# Altium footprint library MAX22190ATJ&plus_.PcbLib: 3 footprints
Each footprint in its own frame and in the unit in brackets; x right, y up, seen from the top. Pads: shape width x height; smd on the part's side, far side on the other; paste and mask are expansions set on the pad; w line width, h text height; cw(c..) or ccw(c..) is an arc to the next point about the centre after c.
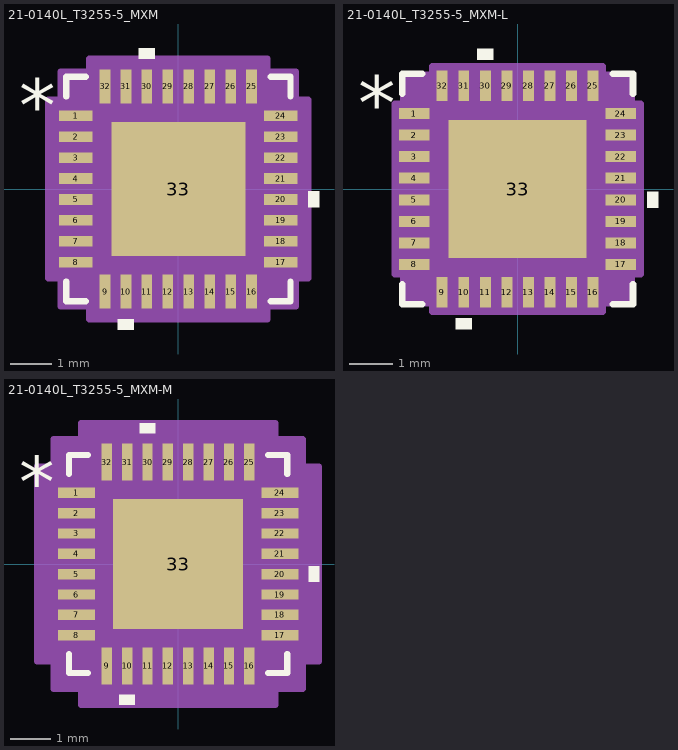
[diagram p0: the footprints below, top view; thin cyan lines are the x and y axes]

## 21-0140L_T3255-5_MXM [mm]
pads (33):
  rect 0.808x0.255 smd paste+0 mask+0: 1(-2.449,1.75) 2(-2.449,1.25) 3(-2.449,0.75) 4(-2.449,0.25) 5(-2.449,-0.25) 6(-2.449,-0.75) 7(-2.449,-1.25) 8(-2.449,-1.75) 17(2.449,-1.75) 18(2.449,-1.25) 19(2.449,-0.75) 20(2.449,-0.25) 21(2.449,0.25) 22(2.449,0.75) 23(2.449,1.25) 24(2.449,1.75)
  rect 0.255x0.808 smd paste+0 mask+0: 9(-1.75,-2.449) 10(-1.25,-2.449) 11(-0.75,-2.449) 12(-0.25,-2.449) 13(0.25,-2.449) 14(0.75,-2.449) 15(1.25,-2.449) 16(1.75,-2.449) 25(1.75,2.449) 26(1.25,2.449) 27(0.75,2.449) 28(0.25,2.449) 29(-0.25,2.449) 30(-0.75,2.449) 31(-1.25,2.449) 32(-1.75,2.449)
  rect 3.2x3.2 smd paste-1.6 mask+0: 33(0,0)
Top Overlay:
  region: -1.06,-3.107 -1.441,-3.107 -1.441,-3.361 -1.06,-3.361
  region: 3.107,-0.059 3.361,-0.059 3.361,-0.44 3.107,-0.44
  region: -0.56,3.107 -0.941,3.107 -0.941,3.361 -0.56,3.361
  lines w0.152: -2.68,-2.21 -2.68,-2.68 -2.21,-2.68 ; -2.68,2.21 -2.68,2.68 -2.21,2.68 ; 2.21,-2.68 2.68,-2.68 2.68,-2.21 ; 2.21,2.68 2.68,2.68 2.68,2.21
  text "*" at -3.805,1.365 h1.27
  text ".Designator" at -3.492,-0.635 h1.27
Top Paste:
  region: -0.1,1.5 -1.5,1.5 -1.5,0.1 -0.1,0.1
  region: -0.1,-0.1 -1.5,-0.1 -1.5,-1.5 -0.1,-1.5
  region: 1.5,1.5 0.1,1.5 0.1,0.1 1.5,0.1
  region: 1.5,-0.1 0.1,-0.1 0.1,-1.5 1.5,-1.5
Mechanical 13:
  lines w0.025: -2.553,1.283 -1.283,2.553 ; -2.553,-2.553 2.553,-2.553 ; -2.553,-2.553 -2.553,2.553 ; -2.553,-2.553 -2.553,-2.553 ; -2.553,-1.902 -2.553,-1.598 ; -2.553,-1.902 -2.553,-1.598 ; -2.553,-1.902 -2.553,-1.902 ; -2.553,-1.598 -2.553,-1.598 ; -2.553,-1.402 -2.553,-1.098 ; -2.553,-1.402 -2.553,-1.098 ; -2.553,-1.402 -2.553,-1.402 ; -2.553,-1.098 -2.553,-1.098 ; -2.553,-0.902 -2.553,-0.598 ; -2.553,-0.902 -2.553,-0.598 ; -2.553,-0.902 -2.553,-0.902 ; -2.553,-0.598 -2.553,-0.598 ; -2.553,-0.402 -2.553,-0.098 ; -2.553,-0.402 -2.553,-0.098 ; -2.553,-0.402 -2.553,-0.402 ; -2.553,-0.098 -2.553,-0.098 ; -2.553,0.098 -2.553,0.402 ; -2.553,0.098 -2.553,0.402 ; -2.553,0.098 -2.553,0.098 ; -2.553,0.402 -2.553,0.402 ; -2.553,0.598 -2.553,0.902 ; -2.553,0.598 -2.553,0.902 ; -2.553,0.598 -2.553,0.598 ; -2.553,0.902 -2.553,0.902 ; -2.553,1.098 -2.553,1.402 ; -2.553,1.098 -2.553,1.402 ; -2.553,1.098 -2.553,1.098 ; -2.553,1.402 -2.553,1.402 ; -2.553,1.598 -2.553,1.902 ; -2.553,1.598 -2.553,1.902 ; -2.553,1.598 -2.553,1.598 ; -2.553,1.902 -2.553,1.902 ; -2.553,2.553 2.553,2.553 ; -2.553,2.553 -2.553,2.553 ; -1.902,-2.553 -1.598,-2.553 ; -1.902,-2.553 -1.902,-2.553 ; -1.902,-2.553 -1.598,-2.553 ; -1.902,2.553 -1.598,2.553 ; -1.902,2.553 -1.598,2.553 ; -1.902,2.553 -1.902,2.553 ; -1.598,-2.553 -1.598,-2.553 ; -1.598,2.553 -1.598,2.553 ; -1.402,-2.553 -1.098,-2.553 ; -1.402,-2.553 -1.402,-2.553 ; -1.402,-2.553 -1.098,-2.553 ; -1.402,2.553 -1.098,2.553 ; -1.402,2.553 -1.098,2.553 ; -1.402,2.553 -1.402,2.553 ; -1.098,-2.553 -1.098,-2.553 ; -1.098,2.553 -1.098,2.553 ; -0.902,-2.553 -0.598,-2.553 ; -0.902,-2.553 -0.902,-2.553 ; -0.902,-2.553 -0.598,-2.553 ; -0.902,2.553 -0.598,2.553 ; -0.902,2.553 -0.598,2.553 ; -0.902,2.553 -0.902,2.553 ; -0.598,-2.553 -0.598,-2.553 ; -0.598,2.553 -0.598,2.553 ; -0.402,-2.553 -0.098,-2.553 ; -0.402,-2.553 -0.402,-2.553 ; -0.402,-2.553 -0.098,-2.553 ; -0.402,2.553 -0.098,2.553 ; -0.402,2.553 -0.098,2.553 ; -0.402,2.553 -0.402,2.553 ; -0.098,-2.553 -0.098,-2.553 ; -0.098,2.553 -0.098,2.553 ; 0.098,-2.553 0.402,-2.553 ; 0.098,-2.553 0.098,-2.553 ; 0.098,-2.553 0.402,-2.553 ; 0.098,2.553 0.402,2.553 ; 0.098,2.553 0.402,2.553 ; 0.098,2.553 0.098,2.553 ; 0.402,-2.553 0.402,-2.553 ; 0.402,2.553 0.402,2.553 ; 0.598,-2.553 0.902,-2.553 ; 0.598,-2.553 0.598,-2.553 ; 0.598,-2.553 0.902,-2.553 ; 0.598,2.553 0.902,2.553 ; 0.598,2.553 0.902,2.553 ; 0.598,2.553 0.598,2.553 ; 0.902,-2.553 0.902,-2.553 ; 0.902,2.553 0.902,2.553 ; 1.098,-2.553 1.402,-2.553 ; 1.098,-2.553 1.098,-2.553 ; 1.098,-2.553 1.402,-2.553 ; 1.098,2.553 1.402,2.553 ; 1.098,2.553 1.402,2.553 ; 1.098,2.553 1.098,2.553 ; 1.402,-2.553 1.402,-2.553 ; 1.402,2.553 1.402,2.553 ; 1.598,-2.553 1.902,-2.553 ; 1.598,-2.553 1.598,-2.553 ; 1.598,-2.553 1.902,-2.553 ; 1.598,2.553 1.902,2.553 ; 1.598,2.553 1.902,2.553 ; 1.598,2.553 1.598,2.553 ; 1.902,-2.553 1.902,-2.553 ; 1.902,2.553 1.902,2.553 ; 2.553,-2.553 2.553,-2.553 ; 2.553,-2.553 2.553,2.553 ; 2.553,-1.902 2.553,-1.598 ; 2.553,-1.902 2.553,-1.902 ; 2.553,-1.902 2.553,-1.598 ; 2.553,-1.598 2.553,-1.598 ; 2.553,-1.402 2.553,-1.098 ; 2.553,-1.402 2.553,-1.402 ; 2.553,-1.402 2.553,-1.098 ; 2.553,-1.098 2.553,-1.098 ; 2.553,-0.902 2.553,-0.598 ; 2.553,-0.902 2.553,-0.902 ; 2.553,-0.902 2.553,-0.598 ; 2.553,-0.598 2.553,-0.598 ; 2.553,-0.402 2.553,-0.098 ; 2.553,-0.402 2.553,-0.402 ; 2.553,-0.402 2.553,-0.098 ; 2.553,-0.098 2.553,-0.098 ; 2.553,0.098 2.553,0.402 ; 2.553,0.098 2.553,0.098 ; 2.553,0.098 2.553,0.402 ; 2.553,0.402 2.553,0.402 ; 2.553,0.598 2.553,0.902 ; 2.553,0.598 2.553,0.598 ; 2.553,0.598 2.553,0.902 ; 2.553,0.902 2.553,0.902 ; 2.553,1.098 2.553,1.402 ; 2.553,1.098 2.553,1.098 ; 2.553,1.098 2.553,1.402 ; 2.553,1.402 2.553,1.402 ; 2.553,1.598 2.553,1.902 ; 2.553,1.598 2.553,1.598 ; 2.553,1.598 2.553,1.902 ; 2.553,1.902 2.553,1.902 ; 2.553,2.553 2.553,2.553
  text ".Designator" at -3.492,-0.635 h1.27
  text "*" at -2.362,1.365 h1.27
Mechanical 15:
  region: -2.131,-2.807 -2.807,-2.807 -2.807,-2.131 -3.107,-2.131 -3.107,2.131 -2.807,2.131 -2.807,2.807 -2.131,2.807 -2.131,3.107 2.131,3.107 2.131,2.807 2.807,2.807 2.807,2.131 3.107,2.131 3.107,-2.131 2.807,-2.131 2.807,-2.807 2.131,-2.807 2.131,-3.107 -2.131,-3.107
  lines w0.152: -3.107,-2.131 -2.807,-2.131 -2.807,-2.807 -2.131,-2.807 -2.131,-3.107 2.131,-3.107 2.131,-2.807 2.807,-2.807 2.807,-2.131 3.107,-2.131 3.107,2.131 2.807,2.131 2.807,2.807 2.131,2.807 2.131,3.107 -2.131,3.107 -2.131,2.807 -2.807,2.807 -2.807,2.131 -3.107,2.131 -3.107,-2.131
3D body "21-0140L_T3255-5_MXM.step": height 0.81, standoff 0, extent -2.553,-2.553 2.553,2.553

## 21-0140L_T3255-5_MXM-L [mm]
pads (33):
  rect 0.708x0.255 smd paste+0 mask+0: 1(-2.399,1.75) 2(-2.399,1.25) 3(-2.399,0.75) 4(-2.399,0.25) 5(-2.399,-0.25) 6(-2.399,-0.75) 7(-2.399,-1.25) 8(-2.399,-1.75) 17(2.399,-1.75) 18(2.399,-1.25) 19(2.399,-0.75) 20(2.399,-0.25) 21(2.399,0.25) 22(2.399,0.75) 23(2.399,1.25) 24(2.399,1.75)
  rect 0.255x0.708 smd paste+0 mask+0: 9(-1.75,-2.399) 10(-1.25,-2.399) 11(-0.75,-2.399) 12(-0.25,-2.399) 13(0.25,-2.399) 14(0.75,-2.399) 15(1.25,-2.399) 16(1.75,-2.399) 25(1.75,2.399) 26(1.25,2.399) 27(0.75,2.399) 28(0.25,2.399) 29(-0.25,2.399) 30(-0.75,2.399) 31(-1.25,2.399) 32(-1.75,2.399)
  rect 3.2x3.2 smd paste-1.6 mask+0: 33(0,0)
Top Overlay:
  region: -1.06,-3.007 -1.441,-3.007 -1.441,-3.261 -1.06,-3.261
  region: 3.007,-0.059 3.261,-0.059 3.261,-0.44 3.007,-0.44
  region: -0.56,3.007 -0.941,3.007 -0.941,3.261 -0.56,3.261
  lines w0.152: -2.68,-2.21 -2.68,-2.68 -2.21,-2.68 ; -2.68,2.21 -2.68,2.68 -2.21,2.68 ; 2.21,-2.68 2.68,-2.68 2.68,-2.21 ; 2.21,2.68 2.68,2.68 2.68,2.21
  text "*" at -3.705,1.365 h1.27
  text ".Designator" at -3.492,-0.635 h1.27
Top Paste:
  region: -0.1,1.5 -1.5,1.5 -1.5,0.1 -0.1,0.1
  region: -0.1,-0.1 -1.5,-0.1 -1.5,-1.5 -0.1,-1.5
  region: 1.5,1.5 0.1,1.5 0.1,0.1 1.5,0.1
  region: 1.5,-0.1 0.1,-0.1 0.1,-1.5 1.5,-1.5
Mechanical 13:
  lines w0.025: -2.553,1.283 -1.283,2.553 ; -2.553,-2.553 2.553,-2.553 ; -2.553,-2.553 -2.553,2.553 ; -2.553,-2.553 -2.553,-2.553 ; -2.553,-1.902 -2.553,-1.598 ; -2.553,-1.902 -2.553,-1.598 ; -2.553,-1.902 -2.553,-1.902 ; -2.553,-1.598 -2.553,-1.598 ; -2.553,-1.402 -2.553,-1.098 ; -2.553,-1.402 -2.553,-1.098 ; -2.553,-1.402 -2.553,-1.402 ; -2.553,-1.098 -2.553,-1.098 ; -2.553,-0.902 -2.553,-0.598 ; -2.553,-0.902 -2.553,-0.598 ; -2.553,-0.902 -2.553,-0.902 ; -2.553,-0.598 -2.553,-0.598 ; -2.553,-0.402 -2.553,-0.098 ; -2.553,-0.402 -2.553,-0.098 ; -2.553,-0.402 -2.553,-0.402 ; -2.553,-0.098 -2.553,-0.098 ; -2.553,0.098 -2.553,0.402 ; -2.553,0.098 -2.553,0.402 ; -2.553,0.098 -2.553,0.098 ; -2.553,0.402 -2.553,0.402 ; -2.553,0.598 -2.553,0.902 ; -2.553,0.598 -2.553,0.902 ; -2.553,0.598 -2.553,0.598 ; -2.553,0.902 -2.553,0.902 ; -2.553,1.098 -2.553,1.402 ; -2.553,1.098 -2.553,1.402 ; -2.553,1.098 -2.553,1.098 ; -2.553,1.402 -2.553,1.402 ; -2.553,1.598 -2.553,1.902 ; -2.553,1.598 -2.553,1.902 ; -2.553,1.598 -2.553,1.598 ; -2.553,1.902 -2.553,1.902 ; -2.553,2.553 2.553,2.553 ; -2.553,2.553 -2.553,2.553 ; -1.902,-2.553 -1.598,-2.553 ; -1.902,-2.553 -1.902,-2.553 ; -1.902,-2.553 -1.598,-2.553 ; -1.902,2.553 -1.598,2.553 ; -1.902,2.553 -1.598,2.553 ; -1.902,2.553 -1.902,2.553 ; -1.598,-2.553 -1.598,-2.553 ; -1.598,2.553 -1.598,2.553 ; -1.402,-2.553 -1.098,-2.553 ; -1.402,-2.553 -1.402,-2.553 ; -1.402,-2.553 -1.098,-2.553 ; -1.402,2.553 -1.098,2.553 ; -1.402,2.553 -1.098,2.553 ; -1.402,2.553 -1.402,2.553 ; -1.098,-2.553 -1.098,-2.553 ; -1.098,2.553 -1.098,2.553 ; -0.902,-2.553 -0.598,-2.553 ; -0.902,-2.553 -0.902,-2.553 ; -0.902,-2.553 -0.598,-2.553 ; -0.902,2.553 -0.598,2.553 ; -0.902,2.553 -0.598,2.553 ; -0.902,2.553 -0.902,2.553 ; -0.598,-2.553 -0.598,-2.553 ; -0.598,2.553 -0.598,2.553 ; -0.402,-2.553 -0.098,-2.553 ; -0.402,-2.553 -0.402,-2.553 ; -0.402,-2.553 -0.098,-2.553 ; -0.402,2.553 -0.098,2.553 ; -0.402,2.553 -0.098,2.553 ; -0.402,2.553 -0.402,2.553 ; -0.098,-2.553 -0.098,-2.553 ; -0.098,2.553 -0.098,2.553 ; 0.098,-2.553 0.402,-2.553 ; 0.098,-2.553 0.098,-2.553 ; 0.098,-2.553 0.402,-2.553 ; 0.098,2.553 0.402,2.553 ; 0.098,2.553 0.402,2.553 ; 0.098,2.553 0.098,2.553 ; 0.402,-2.553 0.402,-2.553 ; 0.402,2.553 0.402,2.553 ; 0.598,-2.553 0.902,-2.553 ; 0.598,-2.553 0.598,-2.553 ; 0.598,-2.553 0.902,-2.553 ; 0.598,2.553 0.902,2.553 ; 0.598,2.553 0.902,2.553 ; 0.598,2.553 0.598,2.553 ; 0.902,-2.553 0.902,-2.553 ; 0.902,2.553 0.902,2.553 ; 1.098,-2.553 1.402,-2.553 ; 1.098,-2.553 1.098,-2.553 ; 1.098,-2.553 1.402,-2.553 ; 1.098,2.553 1.402,2.553 ; 1.098,2.553 1.402,2.553 ; 1.098,2.553 1.098,2.553 ; 1.402,-2.553 1.402,-2.553 ; 1.402,2.553 1.402,2.553 ; 1.598,-2.553 1.902,-2.553 ; 1.598,-2.553 1.598,-2.553 ; 1.598,-2.553 1.902,-2.553 ; 1.598,2.553 1.902,2.553 ; 1.598,2.553 1.902,2.553 ; 1.598,2.553 1.598,2.553 ; 1.902,-2.553 1.902,-2.553 ; 1.902,2.553 1.902,2.553 ; 2.553,-2.553 2.553,-2.553 ; 2.553,-2.553 2.553,2.553 ; 2.553,-1.902 2.553,-1.598 ; 2.553,-1.902 2.553,-1.902 ; 2.553,-1.902 2.553,-1.598 ; 2.553,-1.598 2.553,-1.598 ; 2.553,-1.402 2.553,-1.098 ; 2.553,-1.402 2.553,-1.402 ; 2.553,-1.402 2.553,-1.098 ; 2.553,-1.098 2.553,-1.098 ; 2.553,-0.902 2.553,-0.598 ; 2.553,-0.902 2.553,-0.902 ; 2.553,-0.902 2.553,-0.598 ; 2.553,-0.598 2.553,-0.598 ; 2.553,-0.402 2.553,-0.098 ; 2.553,-0.402 2.553,-0.402 ; 2.553,-0.402 2.553,-0.098 ; 2.553,-0.098 2.553,-0.098 ; 2.553,0.098 2.553,0.402 ; 2.553,0.098 2.553,0.098 ; 2.553,0.098 2.553,0.402 ; 2.553,0.402 2.553,0.402 ; 2.553,0.598 2.553,0.902 ; 2.553,0.598 2.553,0.598 ; 2.553,0.598 2.553,0.902 ; 2.553,0.902 2.553,0.902 ; 2.553,1.098 2.553,1.402 ; 2.553,1.098 2.553,1.098 ; 2.553,1.098 2.553,1.402 ; 2.553,1.402 2.553,1.402 ; 2.553,1.598 2.553,1.902 ; 2.553,1.598 2.553,1.598 ; 2.553,1.598 2.553,1.902 ; 2.553,1.902 2.553,1.902 ; 2.553,2.553 2.553,2.553
  text ".Designator" at -3.492,-0.635 h1.27
  text "*" at -2.362,1.365 h1.27
Mechanical 15:
  region: -1.979,-2.654 -2.654,-2.654 -2.654,-1.979 -2.854,-1.979 -2.854,1.979 -2.654,1.979 -2.654,2.654 -1.979,2.654 -1.979,2.854 1.979,2.854 1.979,2.654 2.654,2.654 2.654,1.979 2.854,1.979 2.854,-1.979 2.654,-1.979 2.654,-2.654 1.979,-2.654 1.979,-2.854 -1.979,-2.854
  lines w0.152: -2.854,-1.979 -2.654,-1.979 -2.654,-2.654 -1.979,-2.654 -1.979,-2.854 1.979,-2.854 1.979,-2.654 2.654,-2.654 2.654,-1.979 2.854,-1.979 2.854,1.979 2.654,1.979 2.654,2.654 1.979,2.654 1.979,2.854 -1.979,2.854 -1.979,2.654 -2.654,2.654 -2.654,1.979 -2.854,1.979 -2.854,-1.979
3D body "21-0140L_T3255-5_MXM.step": height 0.81, standoff 0, extent -2.553,-2.553 2.553,2.553

## 21-0140L_T3255-5_MXM-M [mm]
pads (33):
  rect 0.908x0.255 smd paste+0 mask+0: 1(-2.499,1.75) 2(-2.499,1.25) 3(-2.499,0.75) 4(-2.499,0.25) 5(-2.499,-0.25) 6(-2.499,-0.75) 7(-2.499,-1.25) 8(-2.499,-1.75) 17(2.499,-1.75) 18(2.499,-1.25) 19(2.499,-0.75) 20(2.499,-0.25) 21(2.499,0.25) 22(2.499,0.75) 23(2.499,1.25) 24(2.499,1.75)
  rect 0.255x0.908 smd paste+0 mask+0: 9(-1.75,-2.499) 10(-1.25,-2.499) 11(-0.75,-2.499) 12(-0.25,-2.499) 13(0.25,-2.499) 14(0.75,-2.499) 15(1.25,-2.499) 16(1.75,-2.499) 25(1.75,2.499) 26(1.25,2.499) 27(0.75,2.499) 28(0.25,2.499) 29(-0.25,2.499) 30(-0.75,2.499) 31(-1.25,2.499) 32(-1.75,2.499)
  rect 3.2x3.2 smd paste-1.6 mask+0: 33(0,0)
Top Overlay:
  region: -1.06,-3.207 -1.441,-3.207 -1.441,-3.461 -1.06,-3.461
  region: 3.207,-0.059 3.461,-0.059 3.461,-0.44 3.207,-0.44
  region: -0.56,3.207 -0.941,3.207 -0.941,3.461 -0.56,3.461
  lines w0.152: -2.68,-2.21 -2.68,-2.68 -2.21,-2.68 ; -2.68,2.21 -2.68,2.68 -2.21,2.68 ; 2.21,-2.68 2.68,-2.68 2.68,-2.21 ; 2.21,2.68 2.68,2.68 2.68,2.21
  text "*" at -3.905,1.365 h1.27
  text ".Designator" at -3.492,-0.635 h1.27
Top Paste:
  region: -0.1,1.5 -1.5,1.5 -1.5,0.1 -0.1,0.1
  region: -0.1,-0.1 -1.5,-0.1 -1.5,-1.5 -0.1,-1.5
  region: 1.5,1.5 0.1,1.5 0.1,0.1 1.5,0.1
  region: 1.5,-0.1 0.1,-0.1 0.1,-1.5 1.5,-1.5
Mechanical 13:
  lines w0.025: -2.553,1.283 -1.283,2.553 ; -2.553,-2.553 2.553,-2.553 ; -2.553,-2.553 -2.553,2.553 ; -2.553,-2.553 -2.553,-2.553 ; -2.553,-1.902 -2.553,-1.598 ; -2.553,-1.902 -2.553,-1.598 ; -2.553,-1.902 -2.553,-1.902 ; -2.553,-1.598 -2.553,-1.598 ; -2.553,-1.402 -2.553,-1.098 ; -2.553,-1.402 -2.553,-1.098 ; -2.553,-1.402 -2.553,-1.402 ; -2.553,-1.098 -2.553,-1.098 ; -2.553,-0.902 -2.553,-0.598 ; -2.553,-0.902 -2.553,-0.598 ; -2.553,-0.902 -2.553,-0.902 ; -2.553,-0.598 -2.553,-0.598 ; -2.553,-0.402 -2.553,-0.098 ; -2.553,-0.402 -2.553,-0.098 ; -2.553,-0.402 -2.553,-0.402 ; -2.553,-0.098 -2.553,-0.098 ; -2.553,0.098 -2.553,0.402 ; -2.553,0.098 -2.553,0.402 ; -2.553,0.098 -2.553,0.098 ; -2.553,0.402 -2.553,0.402 ; -2.553,0.598 -2.553,0.902 ; -2.553,0.598 -2.553,0.902 ; -2.553,0.598 -2.553,0.598 ; -2.553,0.902 -2.553,0.902 ; -2.553,1.098 -2.553,1.402 ; -2.553,1.098 -2.553,1.402 ; -2.553,1.098 -2.553,1.098 ; -2.553,1.402 -2.553,1.402 ; -2.553,1.598 -2.553,1.902 ; -2.553,1.598 -2.553,1.902 ; -2.553,1.598 -2.553,1.598 ; -2.553,1.902 -2.553,1.902 ; -2.553,2.553 2.553,2.553 ; -2.553,2.553 -2.553,2.553 ; -1.902,-2.553 -1.598,-2.553 ; -1.902,-2.553 -1.902,-2.553 ; -1.902,-2.553 -1.598,-2.553 ; -1.902,2.553 -1.598,2.553 ; -1.902,2.553 -1.598,2.553 ; -1.902,2.553 -1.902,2.553 ; -1.598,-2.553 -1.598,-2.553 ; -1.598,2.553 -1.598,2.553 ; -1.402,-2.553 -1.098,-2.553 ; -1.402,-2.553 -1.402,-2.553 ; -1.402,-2.553 -1.098,-2.553 ; -1.402,2.553 -1.098,2.553 ; -1.402,2.553 -1.098,2.553 ; -1.402,2.553 -1.402,2.553 ; -1.098,-2.553 -1.098,-2.553 ; -1.098,2.553 -1.098,2.553 ; -0.902,-2.553 -0.598,-2.553 ; -0.902,-2.553 -0.902,-2.553 ; -0.902,-2.553 -0.598,-2.553 ; -0.902,2.553 -0.598,2.553 ; -0.902,2.553 -0.598,2.553 ; -0.902,2.553 -0.902,2.553 ; -0.598,-2.553 -0.598,-2.553 ; -0.598,2.553 -0.598,2.553 ; -0.402,-2.553 -0.098,-2.553 ; -0.402,-2.553 -0.402,-2.553 ; -0.402,-2.553 -0.098,-2.553 ; -0.402,2.553 -0.098,2.553 ; -0.402,2.553 -0.098,2.553 ; -0.402,2.553 -0.402,2.553 ; -0.098,-2.553 -0.098,-2.553 ; -0.098,2.553 -0.098,2.553 ; 0.098,-2.553 0.402,-2.553 ; 0.098,-2.553 0.098,-2.553 ; 0.098,-2.553 0.402,-2.553 ; 0.098,2.553 0.402,2.553 ; 0.098,2.553 0.402,2.553 ; 0.098,2.553 0.098,2.553 ; 0.402,-2.553 0.402,-2.553 ; 0.402,2.553 0.402,2.553 ; 0.598,-2.553 0.902,-2.553 ; 0.598,-2.553 0.598,-2.553 ; 0.598,-2.553 0.902,-2.553 ; 0.598,2.553 0.902,2.553 ; 0.598,2.553 0.902,2.553 ; 0.598,2.553 0.598,2.553 ; 0.902,-2.553 0.902,-2.553 ; 0.902,2.553 0.902,2.553 ; 1.098,-2.553 1.402,-2.553 ; 1.098,-2.553 1.098,-2.553 ; 1.098,-2.553 1.402,-2.553 ; 1.098,2.553 1.402,2.553 ; 1.098,2.553 1.402,2.553 ; 1.098,2.553 1.098,2.553 ; 1.402,-2.553 1.402,-2.553 ; 1.402,2.553 1.402,2.553 ; 1.598,-2.553 1.902,-2.553 ; 1.598,-2.553 1.598,-2.553 ; 1.598,-2.553 1.902,-2.553 ; 1.598,2.553 1.902,2.553 ; 1.598,2.553 1.902,2.553 ; 1.598,2.553 1.598,2.553 ; 1.902,-2.553 1.902,-2.553 ; 1.902,2.553 1.902,2.553 ; 2.553,-2.553 2.553,-2.553 ; 2.553,-2.553 2.553,2.553 ; 2.553,-1.902 2.553,-1.598 ; 2.553,-1.902 2.553,-1.902 ; 2.553,-1.902 2.553,-1.598 ; 2.553,-1.598 2.553,-1.598 ; 2.553,-1.402 2.553,-1.098 ; 2.553,-1.402 2.553,-1.402 ; 2.553,-1.402 2.553,-1.098 ; 2.553,-1.098 2.553,-1.098 ; 2.553,-0.902 2.553,-0.598 ; 2.553,-0.902 2.553,-0.902 ; 2.553,-0.902 2.553,-0.598 ; 2.553,-0.598 2.553,-0.598 ; 2.553,-0.402 2.553,-0.098 ; 2.553,-0.402 2.553,-0.402 ; 2.553,-0.402 2.553,-0.098 ; 2.553,-0.098 2.553,-0.098 ; 2.553,0.098 2.553,0.402 ; 2.553,0.098 2.553,0.098 ; 2.553,0.098 2.553,0.402 ; 2.553,0.402 2.553,0.402 ; 2.553,0.598 2.553,0.902 ; 2.553,0.598 2.553,0.598 ; 2.553,0.598 2.553,0.902 ; 2.553,0.902 2.553,0.902 ; 2.553,1.098 2.553,1.402 ; 2.553,1.098 2.553,1.098 ; 2.553,1.098 2.553,1.402 ; 2.553,1.402 2.553,1.402 ; 2.553,1.598 2.553,1.902 ; 2.553,1.598 2.553,1.598 ; 2.553,1.598 2.553,1.902 ; 2.553,1.902 2.553,1.902 ; 2.553,2.553 2.553,2.553
  text ".Designator" at -3.492,-0.635 h1.27
  text "*" at -2.362,1.365 h1.27
Mechanical 15:
  region: -2.385,-3.061 -3.061,-3.061 -3.061,-2.385 -3.461,-2.385 -3.461,2.385 -3.061,2.385 -3.061,3.061 -2.385,3.061 -2.385,3.461 2.385,3.461 2.385,3.061 3.061,3.061 3.061,2.385 3.461,2.385 3.461,-2.385 3.061,-2.385 3.061,-3.061 2.385,-3.061 2.385,-3.461 -2.385,-3.461
  lines w0.152: -3.461,-2.385 -3.061,-2.385 -3.061,-3.061 -2.385,-3.061 -2.385,-3.461 2.385,-3.461 2.385,-3.061 3.061,-3.061 3.061,-2.385 3.461,-2.385 3.461,2.385 3.061,2.385 3.061,3.061 2.385,3.061 2.385,3.461 -2.385,3.461 -2.385,3.061 -3.061,3.061 -3.061,2.385 -3.461,2.385 -3.461,-2.385
3D body "21-0140L_T3255-5_MXM.step": height 0.81, standoff 0, extent -2.553,-2.553 2.553,2.553